# Altium footprint library Connectors.PcbLib: 69 footprints (part 4 of 5)
Each footprint in its own frame and in the unit in brackets; x right, y up, seen from the top. Pads: shape width x height; smd on the part's side, far side on the other; paste and mask are expansions set on the pad; w line width, h text height; cw(c..) or ccw(c..) is an arc to the next point about the centre after c.
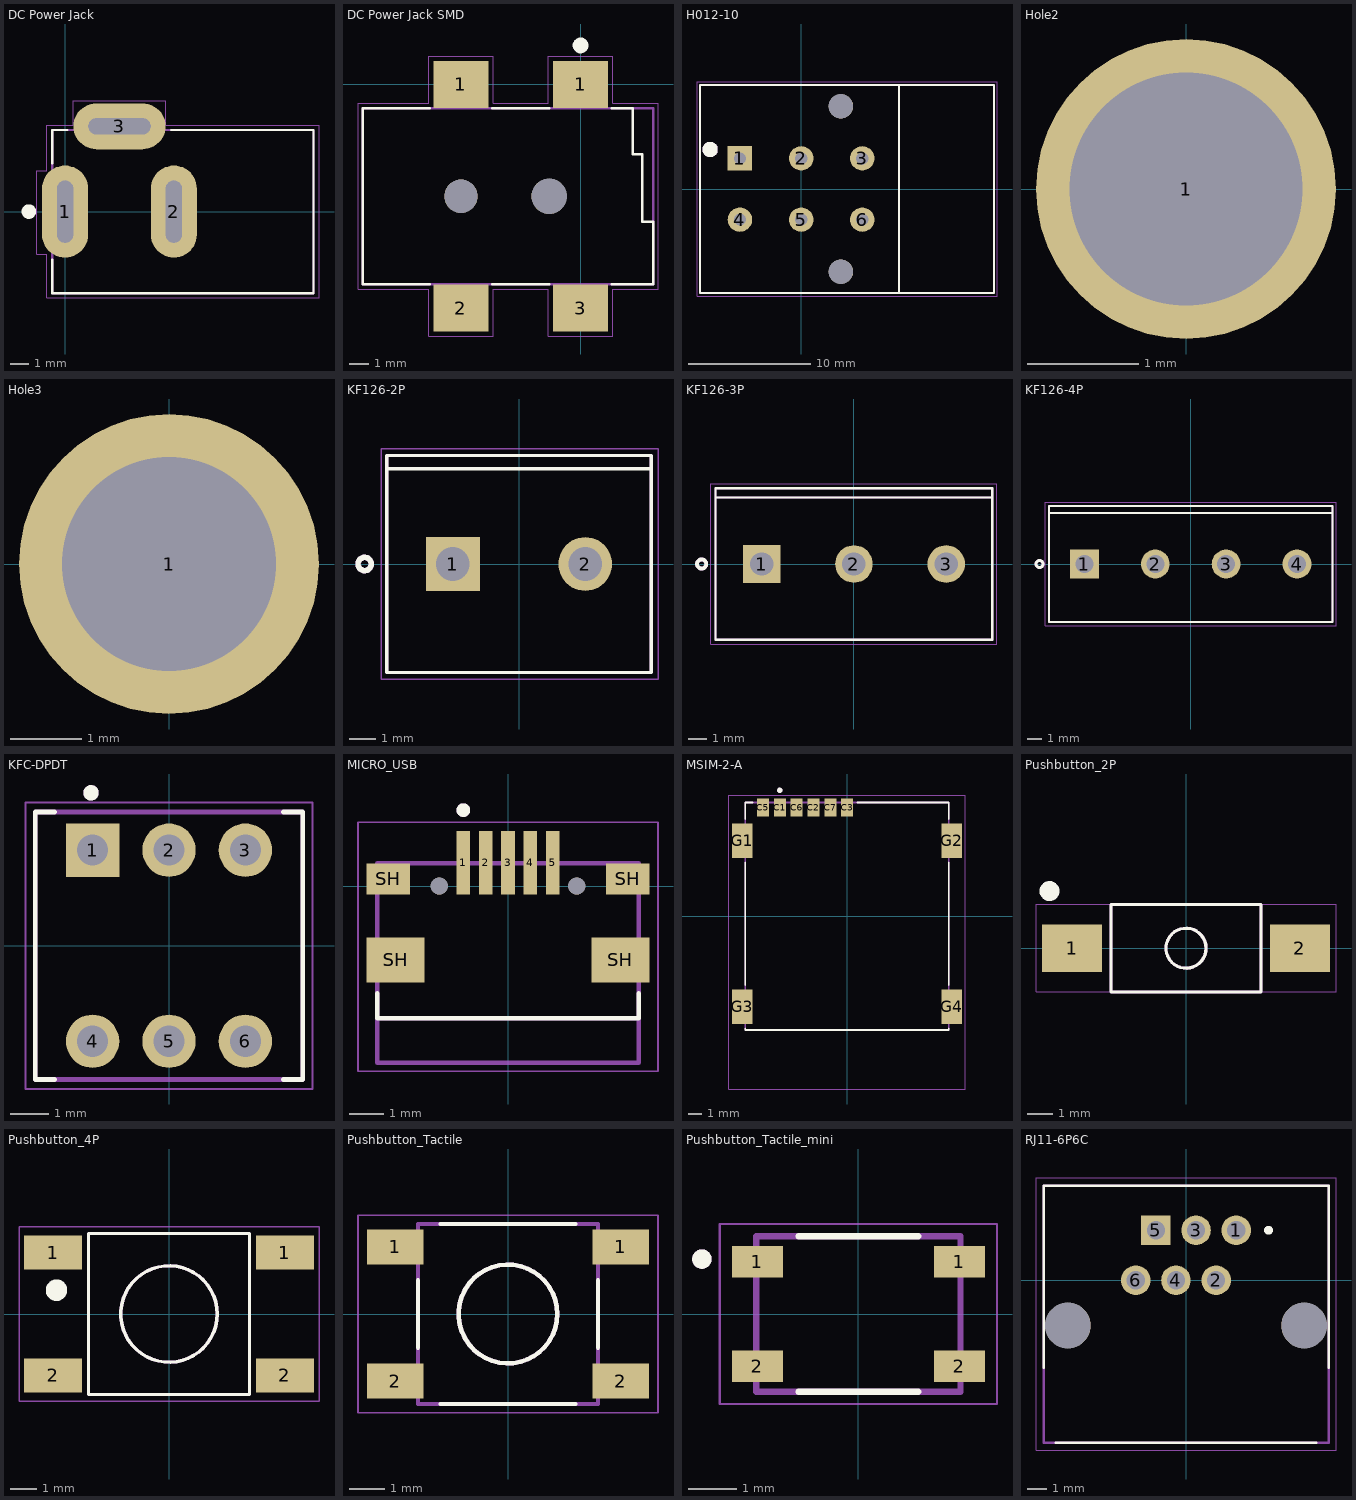
[diagram p3: the footprints below, top view; thin cyan lines are the x and y axes]

## DC Power Jack [mm] "PJ-002A"
pads (3):
  oval 2.54x5.08 hole 0.889 slot 3.429 at 90 deg: 1(0,0) 2(6,0)
  oval 5.08x2.54 hole 0.889 slot 3.429 at 0 deg: 3(3,4.7)
Top Overlay:
  circle w0.4: c-2,0 r0.2
  lines w0.127: -0.7,-2.65 -0.7,-4.5 13.7,-4.5 13.7,4.5 5.842,4.5 ; -0.7,2.667 -0.7,4.5 0.127,4.5
Mechanical 13:
  lines w0.127: -0.7,-4.5 -0.7,4.5 13.7,4.5 13.7,-4.5 -0.7,-4.5
Mechanical 15:
  lines w0.05: -1.55,-2.35 -1,-2.35 -1,-4.75 14,-4.75 14,4.75 5.55,4.75 5.55,6.1 0.45,6.1 0.45,4.75 -1,4.75 -1,2.25 -1.55,2.25 -1.55,-2.35
3D body "DC Power Jack.STEP": height 11, standoff -3.49, extent -0.7,-4.5 13.7,4.9

## DC Power Jack SMD [mm] "PJ-002AH-SMT"
pads (6):
  rect 2.8x2.4 smd: 1(-6.1,0) 1(0,0) 2(-6.1,-11.4) 3(0,-11.4)
  round 1.7 hole 1.7 unplated: ""(-6.1,-5.7)
  round 1.8 hole 1.8 unplated: ""(-1.6,-5.7)
Top Overlay:
  circle w0.4: c0,1.99 r0.2
  lines w0.127: -7.7,-10.2 -11.1,-10.2 -11.1,-1.2 -7.7,-1.2 ; -4.5,-10.2 -1.6,-10.2 ; -4.5,-1.2 -1.6,-1.2 ; 1.6,-10.2 3.7,-10.2 3.7,-7 3.15,-7 3.15,-3.55 2.65,-3.55 2.65,-1.2 1.6,-1.2
Mechanical 13:
  lines w0.127: -11.1,-10.2 -11.1,-1.2 3.7,-1.2 3.7,-10.2 -11.1,-10.2
Mechanical 15:
  lines w0.05: -11.35,-10.45 -7.75,-10.45 -7.75,-12.85 -4.45,-12.85 -4.45,-10.45 -1.65,-10.45 -1.65,-12.85 1.65,-12.85 1.65,-10.45 3.95,-10.45 3.95,-0.95 1.65,-0.95 1.65,1.45 -1.65,1.45 -1.65,-0.95 -4.45,-0.95 -4.45,1.45 -7.75,1.45 -7.75,-0.95 -11.35,-0.95 -11.35,-10.45
3D body "step_temp.STEP": height 11, standoff -0.8, extent -11.1,-11.84 3.8,0.76

## H012-10 [mm] "H012-10"
height 16.4
pads (8):
  rect 2x2 hole 1: 1(-5,2.5)
  round 2 hole 1: 2(0,2.5) 3(5,2.5) 4(-5,-2.5) 5(0,-2.5) 6(5,-2.5)
  round 2 hole 2: ""(3.25,-6.75) ""(3.25,6.75)
Top Overlay:
  circle w0.65: c-7.44,3.228 r0.3
  lines w0.152: 8,-8.509 8,8.509 ; -8.25,-8.509 15.75,-8.509 15.75,8.509 -8.25,8.509 -8.25,-8.509
Mechanical 13:
  circle w0.65: c-7.44,3.228 r0.3
  lines w0.127: -8.252,-8.509 -8.252,8.509 15.75,8.509 15.75,-8.509 -8.252,-8.509
Mechanical 15:
  lines w0.05: -8.509,-8.763 -8.509,8.763 16.002,8.763 16.002,-8.763 -8.509,-8.763
3D body "User Library-H012-10.STEP": height 7.9, standoff -3.1, extent -8.25,-8.5 15.75,8.5

## Hole2 [mm] "2mm"
pads (1):
  round 2.7 hole 2.1: 1(0,0)

## Hole3 [mm] "3mm"
pads (1):
  round 4.2 hole 3: 1(0,0)

## KF126-2P [mil] "KF126-2P"
pads (2):
  rect 80x80 hole 50: 1(-98.43,0)
  round 80 hole 50: 2(98.43,0)
Top Overlay:
  circle w8: c-229.8,0 r9.84
  lines w5: -196.49,141.83 196.7,141.83 ; -196.85,-161.42 196.85,-161.42 196.85,161.42 -196.85,161.42 -196.85,-161.42
Mechanical 13:
  circle w8: c-229.8,0 r9.84
  lines w5: -196.85,-161.42 196.85,-161.42 196.85,161.42 -196.85,161.42 -196.85,-161.42
Mechanical 15:
  lines w1.97: -205,-171.26 -205,171.26 206.69,171.26 206.69,-171.26 -205,-171.26
3D body "KF126-2P.STEP": height 393.7, standoff -137.8, extent -220.47,-161.42 196.85,161.42

## KF126-3P [mil] "KF126-3P"
pads (3):
  rect 80x80 hole 50: 1(-196.85,0)
  round 80 hole 50: 2(0,0) 3(196.85,0)
Top Overlay:
  circle w8: c-324.8,0 r9.84
  lines w5: -295.28,141.73 295.28,141.73 ; 295.28,141.73 295.28,161.42 -295.28,161.42 -295.28,-161.42 295.28,-161.42 295.28,141.73
Mechanical 13:
  circle w8: c-324.8,0 r9.84
  lines w5: -295.28,141.73 295.28,141.73 ; 295.28,141.73 295.28,161.42 -295.28,161.42 -295.28,-161.42 295.28,-161.42 295.28,141.73
Mechanical 15:
  lines w1.97: -305.12,-171.26 305.12,-171.26 305.12,171.26 -305.12,171.26 -305.12,-171.26
3D body "KF126-3P.STEP": height 394.85, standoff -136.65, extent -318.9,-160 295.28,162.83

## KF126-4P [mil] "KF126-4P"
height 393.7
pads (4):
  rect 80x80 hole 50: 1(-295.28,0)
  round 80 hole 50: 2(-98.43,0) 3(98.43,0) 4(295.28,0)
Top Overlay:
  circle w8: c-419.8,0 r9.84
  lines w5: -393.1,141.73 393.58,141.73 ; -393.7,-161.42 393.7,-161.42 393.7,161.42 -393.7,161.42 -393.7,-161.42
Mechanical 13:
  circle w8: c-419.8,0 r9.84
  lines w5: -393.7,-161.42 393.7,-161.42 393.7,161.42 -393.7,161.42 -393.7,-161.42
Mechanical 15:
  lines w1.97: -403.54,-171.26 -403.54,171.26 403.54,171.26 403.54,-171.26 -403.54,-171.26
3D body "KF126-4P.STEP": height 394.7, standoff -136.8, extent -417.32,-161.42 393.7,161.42

## KFC-DPDT [mil] "Pushbutton Switch DPDT Standard Through Hole 7x7"
height 492.13
pads (6):
  rect 55x55 hole 32: 1(-78.74,98.43)
  round 55 hole 32: 2(0,98.43) 3(78.74,98.43) 4(-78.74,-98.43) 5(0,-98.43) 6(78.74,-98.43)
Top Overlay:
  circle w7.87: c-80.31,157.48 r3.94
  lines w5: -118.11,-137.8 -137.8,-137.8 -137.8,137.8 -118.11,137.8 ; 118.11,-137.8 137.8,-137.8 137.8,137.8 118.11,137.8
Mechanical 13:
  circle w7.87: c-80.31,157.48 r3.94
  lines w5: -137.8,-137.8 -137.8,137.8 137.8,137.8 137.8,-137.8 -137.8,-137.8
Mechanical 15:
  lines w1.97: -147.64,-147.64 -147.64,147.64 147.64,147.64 147.64,-147.64 -147.64,-147.64
3D body "step_temp.STEP": height 492.13, standoff -137.8, extent -137.8,-137.8 137.8,137.8

## MICRO_USB [mm] "MICROQTJ"
height 2.4
pads (11):
  rect 0.4x1.85 smd: 1(-1.3,0.685) 2(-0.65,0.685) 3(0,0.685) 4(0.65,0.685) 5(1.3,0.685)
  rect 1.27x0.9 smd: SH(-3.48,0.21) SH(3.48,0.21)
  rect 1.69x1.3 smd: SH(-3.27,-2.15) SH(3.27,-2.15)
  round 0.5 hole 0.5 unplated: ""(-2,0) ""(2,0)
Top Overlay:
  circle w0.2: c-1.3,2.21 r0.1
  lines w0.127: -3.8,-3.12 -3.8,-3.85 3.8,-3.85 3.8,-3.12
Mechanical 13:
  circle w0.2: c-1.3,2.21 r0.1
  lines w0.127: -3.8,-3.85 -3.8,-5.14 3.8,-5.14 3.8,-3.85 ; -3.8,-3.85 -3.8,0.66 3.8,0.66 3.8,-3.85 ; -3.8,-3.85 3.8,-3.85
Mechanical 15:
  lines w0.05: -4.365,-5.39 4.365,-5.39 4.365,1.86 -4.365,1.86 -4.365,-5.39
3D body "step_temp.STEP": height 2.58, standoff -0.55, extent -3.8,-5.2 3.8,1

## MSIM-2-A [mm] "CUI_MSIM-2-A"
height 1.57
pads (10):
  rect 0.9x1.35 smd: C1(-5.07,8.19) C2(-2.53,8.19) C3(0.01,8.19) C5(-6.34,8.19) C6(-3.8,8.19) C7(-1.26,8.19)
  rect 1.55x2.6 smd: G1(-7.9,5.69) G2(7.9,5.69) G3(-7.9,-6.83) G4(7.9,-6.83)
Top Overlay:
  circle w0.2: c-5.07,9.5 r0.1
  lines w0.127: -7.67,-8.45 -7.67,-8.58 7.67,-8.58 7.67,-8.45 ; -7.67,-5.21 -7.67,4.07 ; -7.67,7.31 -7.67,8.58 -7.11,8.58 ; 0.78,8.58 7.67,8.58 7.67,7.31 ; 7.67,-5.21 7.67,4.07
Mechanical 13:
  circle w0.2: c-5.07,9.5 r0.1
  lines w0.127: -7.67,-8.58 -7.67,8.58 7.67,8.58 7.67,-8.58 4.8,-8.58 -7.2,-8.58 -7.67,-8.58
Mechanical 15:
  lines w0.05: -8.925,-13.03 -8.925,9.115 8.925,9.115 8.925,-13.03 -8.925,-13.03
3D body "MSIM-2-A--3DModel-STEP-1.STEP": height 1.44, standoff 0, extent -8.145,-8.6 8.255,8.6

## Pushbutton_2P [mm] "Switch,Pushbutton,Tactile,SPST,SMD"
pads (2):
  rect 2.4x1.9 smd: 1(-4.55,0) 2(4.55,0)
Top Overlay:
  circle w0.127: c0,0 r0.8
  circle w0.4: c-5.461,2.286 r0.2
  lines w0.127: -3,-1.75 -3,1.75 3,1.75 3,-1.75 -3,-1.75
Mechanical 1:
  circle w0.127: c0,0 r0.8
  lines w0.05: -6,-1.75 6,-1.75 6,1.75 -6,1.75 -6,-1.75
  lines w0.127: -3,-1.75 -3,1.75 3,1.75 3,-1.75 -3,-1.75
3D body "Switch-2.STEP": height 2.51, standoff 0, extent -4.026,-1.829 4.026,1.829

## Pushbutton_4P [mil] "Switch,Pushbutton,Tactile,SPST,SMD"
pads (4):
  rect 85x50 smd: 1(-170,90) 1(170,90) 2(-170,-90) 2(170,-90)
Top Overlay:
  circle w15.75: c-165,35 r7.87
  circle w5: c0,0 r70.71
  lines w5: -118.11,-118.11 118.11,-118.11 118.11,118.11 -118.11,118.11 -118.11,-118.11
Mechanical 1:
  circle w5: c0,0 r70.71
  lines w1.97: -220,-127.95 -220,127.95 220,127.95 220,-127.95 -220,-127.95
  lines w5: -118.11,-118.11 118.11,-118.11 118.11,118.11 -118.11,118.11 -118.11,-118.11
3D body "Switch-4.stp": height 169.29, standoff 0, extent -177.5,-118.75 177.5,118.75

## Pushbutton_Tactile [mm] "PTS525SMG15SMTR2LFS"
pads (4):
  rect 1.6x1 smd: 1(-3.2,1.9) 1(3.2,1.9) 2(-3.2,-1.9) 2(3.2,-1.9)
Top Overlay:
  circle w0.127: c0,0 r1.4
  lines w0.127: -2.55,-0.956 -2.55,0.956 ; -1.913,-2.55 1.913,-2.55 ; -1.913,2.55 1.913,2.55 ; 2.55,-0.956 2.55,0.956
Mechanical 13:
  circle w0.127: c0,0 r1.4
  lines w0.127: -2.55,-2.55 -2.55,2.55 2.55,2.55 2.55,-2.55 -2.55,-2.55
Mechanical 15:
  lines w0.05: -4.25,-2.8 4.25,-2.8 4.25,2.8 -4.25,2.8 -4.25,-2.8
3D body "step_temp.STEP": height 1.6, standoff 0, extent -3.2,-2.55 3.2,2.55

## Pushbutton_Tactile_mini [mm] "SKRPABE010"
height 2.5
pads (4):
  rect 1.05x0.65 smd: 1(-2.075,1.075) 1(2.075,1.075) 2(-2.075,-1.075) 2(2.075,-1.075)
Top Overlay:
  circle w0.2: c-3.218,1.13 r0.1
  lines w0.127: -1.23,-1.6 1.23,-1.6 ; -1.23,1.6 1.23,1.6
Mechanical 13:
  circle w0.2: c-3.218,1.13 r0.1
  lines w0.127: -2.1,-1.6 -2.1,1.6 2.1,1.6 2.1,-1.6 -2.1,-1.6
Mechanical 15:
  lines w0.05: -2.85,-1.85 2.85,-1.85 2.85,1.85 -2.85,1.85 -2.85,-1.85
3D body "step_temp.STEP": height 2.5, standoff 0, extent -2.3,-1.6 2.3,1.6

## RJ11-6P6C [mm] "RJ11-6P6C"
pads (8):
  round 1.5 hole 0.92: 1(2.55,2.54) 2(1.53,0) 3(0.51,2.54) 4(-0.51,0) 6(-2.55,0)
  rect 1.5x1.5 hole 0.92: 5(-1.53,2.54)
  round 2.32 hole 2.32 unplated: ""(-6,-2.3) ""(6,-2.3)
Top Overlay:
  circle w0.25: c4.191,2.54 r0.1
  lines w0.127: -7.239,-4.45 -7.239,4.796 7.239,4.796 7.239,-4.45 ; -6.605,-8.25 6.605,-8.25
Mechanical 13:
  lines w0.127: -7.239,-8.255 7.239,-8.255 7.239,4.796 -7.239,4.796 -7.239,-8.255
Mechanical 15:
  lines w0.05: -7.62,-8.636 7.62,-8.636 7.62,5.207 -7.62,5.207 -7.62,-8.636
3D body "TJ6P6C gray.stp": height 14.55, standoff -3.2, extent -7.242,-8.255 7.242,4.745